# Altium footprint library FootPrintLib_11.PcbLib: 376 footprints (part 24 of 24)
Each footprint in its own frame and in the unit in brackets; x right, y up, seen from the top. Pads: shape width x height; smd on the part's side, far side on the other; paste and mask are expansions set on the pad; w line width, h text height; cw(c..) or ccw(c..) is an arc to the next point about the centre after c.
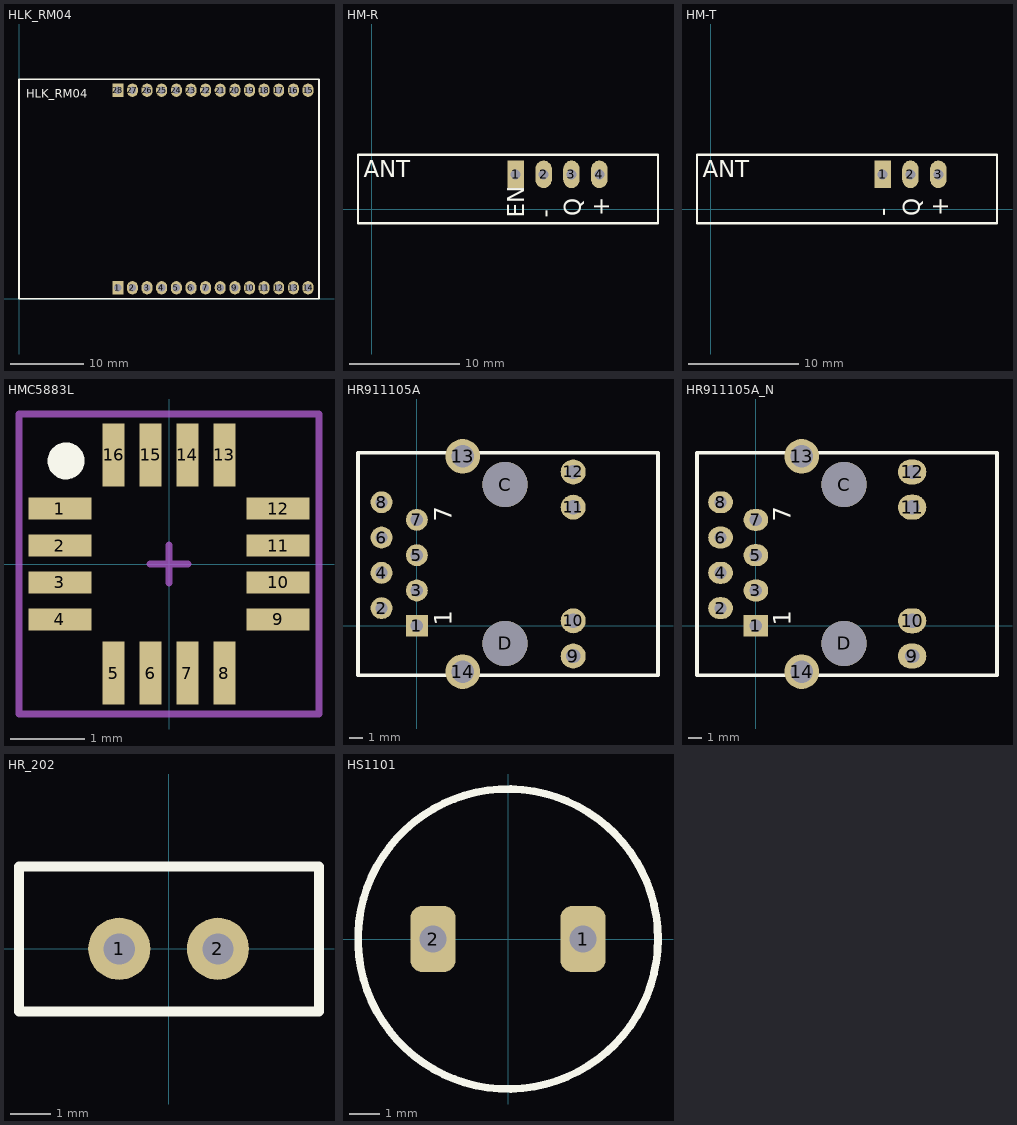
[diagram p23: the footprints below, top view; thin cyan lines are the x and y axes]

## HLK_RM04 [mm]
pads (28):
  rect 1.5x1.8 hole 1: 1(13.5,1.5) 28(13.5,28.5)
  oval 1.5x1.8 hole 1: 2(15.5,1.5) 3(17.5,1.5) 4(19.5,1.5) 5(21.5,1.5) 6(23.5,1.5) 7(25.5,1.5) 8(27.5,1.5) 9(29.5,1.5) 10(31.5,1.5) 11(33.5,1.5) 12(35.5,1.5) 13(37.5,1.5) 14(39.5,1.5) 15(39.5,28.5) 16(37.5,28.5) 17(35.5,28.5) 18(33.5,28.5) 19(31.5,28.5) 20(29.5,28.5) 21(27.5,28.5) 22(25.5,28.5) 23(23.5,28.5) 24(21.5,28.5) 25(19.5,28.5) 26(17.5,28.5) 27(15.5,28.5)
Top Overlay:
  lines w0.254: 0,0 41,0 41,30 0,30 0,0
  text "HLK_RM04" at 1,27.5 h1.14

## HM-R [mm] "Connector; Header; 4 Position"
pads (4):
  rect 1.5x2.5 hole 0.9: 1(13.081,3.175)
  oval 1.5x2.5 hole 0.9: 2(15.621,3.175) 3(18.161,3.175) 4(20.701,3.175)
Top Overlay:
  lines w0.2: 26,-1.27 -1.27,-1.27 -1.27,4.953 26.035,4.953 26.035,-1.27
  text "ANT" at -0.762,2.921 h1.52
  text "+" at 21.59,-0.635 h1.52
  text "Q" at 19.05,-0.635 h1.52
  text "-" at 16.51,-0.762 h1.52
  text "EN" at 13.843,-0.762 h1.52

## HM-T [mm] "Connector; Header; 3 Position"
pads (3):
  rect 1.5x2.5 hole 0.9: 1(15.621,3.175)
  oval 1.5x2.5 hole 0.9: 2(18.161,3.175) 3(20.701,3.175)
Top Overlay:
  lines w0.2: 26,-1.27 -1.27,-1.27 -1.27,4.953 26.035,4.953 26.035,-1.27
  text "ANT" at -0.762,2.921 h1.52
  text "+" at 21.59,-0.635 h1.52
  text "Q" at 19.05,-0.635 h1.52
  text "-" at 16.383,-0.635 h1.52

## HMC5883L [mm] "HMC5883L 3-Axis Digital Compass IC"
height 0.9
pads (16):
  rect 0.85x0.3 smd: 1(-1.478,0.75) 2(-1.478,0.25) 3(-1.478,-0.25) 4(-1.478,-0.75) 9(1.478,-0.75) 10(1.478,-0.25) 11(1.478,0.25) 12(1.478,0.75)
  rect 0.3x0.85 smd: 5(-0.75,-1.478) 6(-0.25,-1.478) 7(0.25,-1.478) 8(0.75,-1.478) 13(0.75,1.478) 14(0.25,1.478) 15(-0.25,1.478) 16(-0.75,1.478)
Top Overlay:
  circle w0.25: c-1.395,1.397 r0.125
Mechanical 15:
  lines w0.1: -0.254,0 0.254,0 ; 0,-0.254 0,0.254 ; -2.032,-2.032 2.032,-2.032 2.032,2.032 -2.032,2.032 -2.032,-2.032
3D body "User Library-QFN-16.step": height 0.9, standoff 0, extent -1.499,-1.499 1.503,1.503

## HR911105A [mm] "HR911105A"
pads (16):
  rect 1.575x1.575 hole 0.889: 1(0,0)
  round 1.575 hole 0.889: 2(-2.54,1.27) 3(0,2.54) 4(-2.54,3.81) 5(0,5.08) 6(-2.54,6.35) 7(0,7.62) 8(-2.54,8.89)
  round 1.8 hole 1.02: 9(11.25,-2.18) 10(11.25,0.36) 11(11.25,8.53) 12(11.25,11.07)
  round 2.5 hole 1.63: 13(3.3,12.19) 14(3.3,-3.3)
  round 3.25 hole 3.25 unplated: C(6.35,10.16) D(6.35,-1.27)
Top Overlay:
  lines w0.254: -4.233,-3.555 17.35,-3.555 17.35,12.445 -4.233,12.445 -4.233,-3.555
  text "1" at 2.5,0 h1.27
  text "7" at 2.5,7.5 h1.27
3D body "User Library-HanRun-HR911105A.step": height 13.5, standoff -3, extent -4.191,-3.495 17.209,12.385

## HR911105A_N [mm] "HR911105A_N"
pads (16):
  rect 1.778x1.575 hole 0.889: 1(0,0)
  oval 1.778x1.575 hole 0.889: 2(-2.54,1.27) 3(0,2.54) 4(-2.54,3.81) 5(0,5.08) 6(-2.54,6.35) 7(0,7.62) 8(-2.54,8.89)
  oval 2.032x1.8 hole 1.02: 9(11.25,-2.18) 10(11.25,0.36) 11(11.25,8.53) 12(11.25,11.07)
  round 2.5 hole 1.63: 13(3.3,12.19) 14(3.3,-3.3)
  round 3.25 hole 3.25 unplated: C(6.35,10.16) D(6.35,-1.27)
Top Overlay:
  lines w0.254: -4.233,-3.555 17.35,-3.555 17.35,12.445 -4.233,12.445 -4.233,-3.555
  text "1" at 2.5,0 h1.27
  text "7" at 2.5,7.5 h1.27
3D body "User Library-HanRun-HR911105A.step": height 13.5, standoff -3, extent -4.191,-3.495 17.209,12.385

## HR_202 [mil]
pads (2):
  round 60 hole 30: 1(-47.64,0) 2(47.64,0)
Top Overlay:
  lines w10: -144.49,-60.63 -144.49,79.53 145.28,79.53 145.28,-60.63 -144.49,-60.63
3D body "HR_202_PCB.SLDPRT": height 492.13, standoff -98.43, extent -139.36,-55.5 140.16,74.42

## HS1101 [mm] "HUMIDITY SENSOR"
height 6
pads (2):
  rrect50% 1.5x2.2 hole 0.9: 1(2.5,0) 2(-2.5,0)
Top Overlay:
  circle w0.254: c0,0 r5